# Altium integrated library PASSIVE_COMPONENTS.IntLib: 7 symbols
Pins are listed as number, name and electrical type; pins without a type are passive.

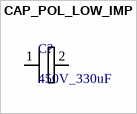
[diagram p0: symbol CAP_POL_LOW_IMP]

## CAP_POL_LOW_IMP
designator C?, comment 450V_330uF
footprint CAP_450V_470uF
footprint CAP_450V_330uF
pins: 1, 2


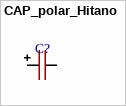
[diagram p1: symbol CAP_polar_Hitano]

## CAP_polar_Hitano
designator C?, comment 1000uF_50V  (value not drawn)
footprint CAP_POL_13x26_1000uF_50V
pins: 1 +, 2 -


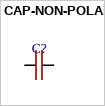
[diagram p2: symbol CAP-NON-POLAR]

## CAP-NON-POLAR
designator C?
footprint CAP-0402
footprint CAP-0201
footprint CAP-0603
footprint CAP-0805
footprint CAP-1206
footprint CAP_1.5uf_400V
footprint CAP_3.3uF_630V
footprint CAP_4.7uF_630V
pins: 1, 2


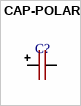
[diagram p3: symbol CAP-POLAR]

## CAP-POLAR
designator C?
footprint CAPPOL-30x35
footprint CAPPOL8x12
footprint CAPPOL-12x25
footprint CAPPOL-10x20
footprint CAP-TAN-A
footprint CAP-TAN-B
footprint CAP-TAN-B2
footprint CAP-TAN-C
footprint CAP-TAN-D
footprint CAP-TAN-R
footprint CAP-TAN-X
footprint CAP 100uF_500V 22x40mm
footprint CAPPOL-16x25
footprint CAP_POL_16x40
footprint CAPPOL-18x40
pins: 1 +, 2 -


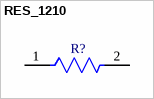
[diagram p4: symbol RES_1210]

## RES_1210
designator R?  (value not drawn)
footprint RES_SMD_1210_IPC_A
footprint RES_SMD_1210_MFG
footprint RES_SMD_1210_IPC_B
footprint RES_SMD_1210_IPC_C
pins: 1, 2


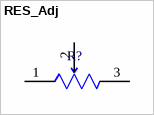
[diagram p5: symbol RES_Adj]

## RES_Adj
designator R?, comment 10K  (value not drawn)
footprint RES_Adj_3296W_Bourns
pins: 1 CCW, 2 WIPER, 3 CW


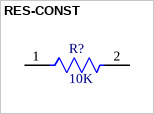
[diagram p6: symbol RES-CONST]

## RES-CONST
designator R?, comment 10K
footprint RES-0603
footprint RES-0201
footprint RES-1206
footprint RES-0402
footprint RES-0805
footprint RES-2512
footprint RES-3921
footprint RES-2W
footprint RES-2W_2
footprint RES_5W_Ceramic_Yageo
footprint RES_10W
pins: 1, 2